# Altium integrated library TPS62133RGTR.IntLib: 1 symbol
Pins are listed as number, name and electrical type; pins without a type are passive.

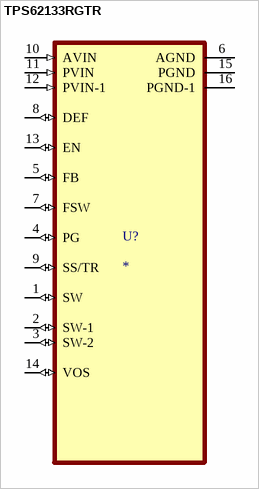
[diagram p0: symbol TPS62133RGTR]

## TPS62133RGTR
designator U?
3-17V 3A Step-Down Converter in 3x3 QFN Package; MF: Texas Instruments; MP: TPS62133RGTR; SnapEDA_Link: https://www.snapeda.com/parts/TPS62133RGTR/Texas+Instruments/view-part/?ref=snap; Package: VQFN-16 Texas Instruments; Value: *; Check_prices: https://www.snapeda.com/parts/TPS62133RGTR/Texas+Instruments/view-part/?ref=eda
footprint QFN50P300X300X100-17N
pins: 1 SW (io), 2 SW-1 (io), 3 SW-2 (io), 4 PG (io), 5 FB (io), 6 AGND (power), 7 FSW (io), 8 DEF (io), 9 SS/TR (io), 10 AVIN (in), 11 PVIN (in), 12 PVIN-1 (in), 13 EN (io), 14 VOS (io), 15 PGND (power), 16 PGND-1 (power)